# Altium schematic symbol library Baro.SchLib: 1 symbol
Pins are listed as number, name and electrical type; pins without a type are passive.

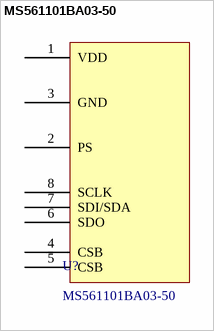
[diagram p0: symbol MS561101BA03-50]

## MS561101BA03-50
designator U?
Barometric Pressure Sensor, with stainless steel cap; Manufacturer: TE Connectivity; Current Rating: 12.5 uA; Resolution: 24 bit; Supply Voltage - Max: 3.6 V; Supply Voltage - Min: 1.8 V; Accuracy: 1.5 mbar; Interface Type: I2C, SPI; Operating Pressure: 10 mbar to 1.2 bar; Output Type: Digital; Pressure Type: Absolute; ComponentLink1Description: Datasheet; ComponentLink1URL: https://www.lcsc.com/datasheet/C15639.pdf?spm=wm.sxq.inf.ggs&lcsc_vid=FlkIUABWQVJeAgZfQwdWUlcFT1ZYUV1ST1deUwVWQ1IxVlNfQ1RdUVNQRVJXUTsOAxUeFF5JWBYZEEoKFBINSQcJGk4NBhADEA4cHktQRlRADxALGw%3D%3D; LCSC Part #: C15639; Manufacturer Part Number: MS561101BA03-50; Mount: SMD/SMT; Operating Temperature Max: + 80 C; Operating Temperature Min: - 40 C; Package / Case: QFN-8; Packaging: Tape and Reel; Supplier 1 Part Number: 824-MS561101BA03-50; Supplier 1 URL: https://www.mouser.vn/en/ProductDetail/TE-Connectivity-Measurement-Specialties/MS561101BA03-50?qs=%252BgKeJhng5iV%252BnCz6Qd5iDw%3D%3D; Supplier 1: Mouser; Supplier 2 Part Number: 223-1622-2-ND; Supplier 2 URL: https://www.digikey.com/en/products/detail/te-connectivity-measurement-specialties/ms561101ba03-50/5277445; Supplier 2: Digi-Key; Supplier 3 Part Number: N/A; Supplier 3 URL: N/A; Supplier 3: thegioiic; Value: MS561101BA03-50
footprint MS561101BA03-50_QFN-8 (QFN, 8-Leads, Body 5.00x3.00mm, Pitch 1.25mm, IPC Medium Density)
pins: 1 VDD, 2 PS, 3 GND, 4 CSB, 5 CSB, 6 SDO, 7 SDI/SDA, 8 SCLK